# Altium footprint library FootPrintLib_3.PcbLib: 198 footprints (part 1 of 13)
Each footprint in its own frame and in the unit in brackets; x right, y up, seen from the top. Pads: shape width x height; smd on the part's side, far side on the other; paste and mask are expansions set on the pad; w line width, h text height; cw(c..) or ccw(c..) is an arc to the next point about the centre after c.
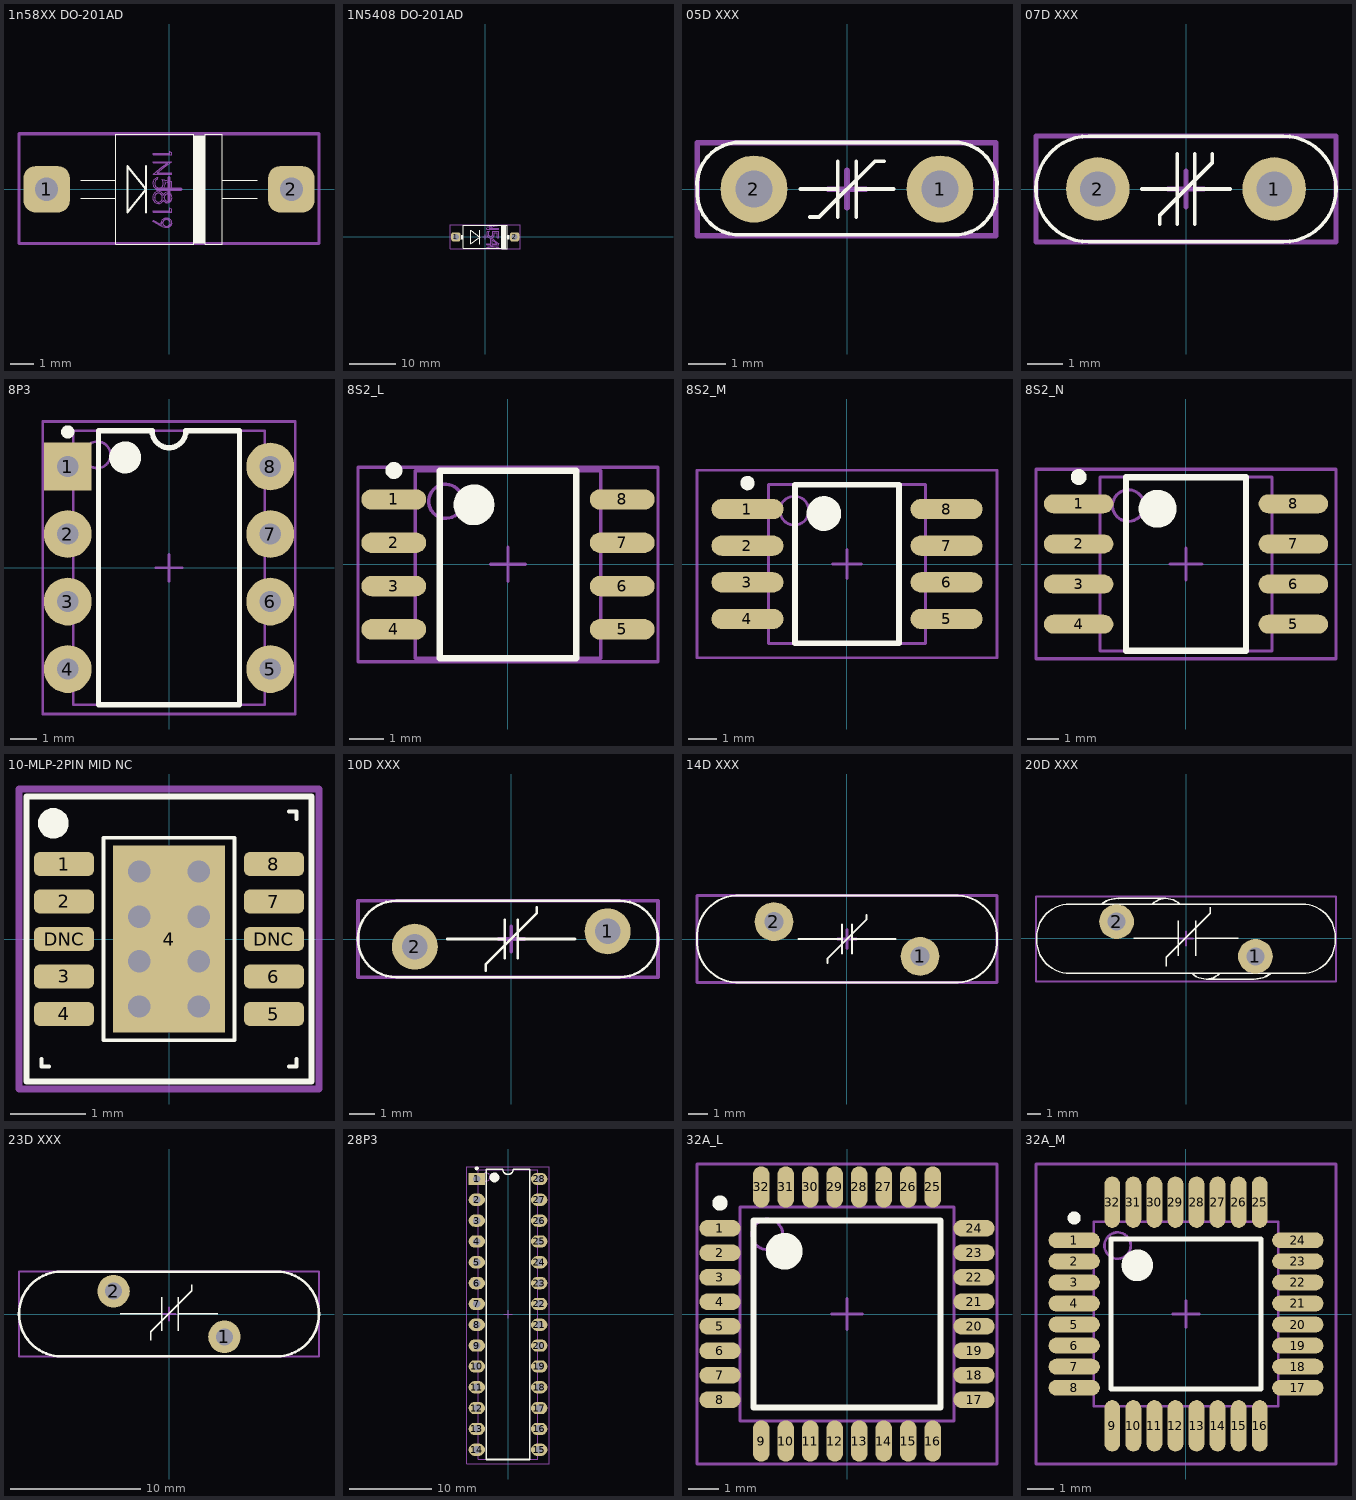
[diagram p0: the footprints below, top view; thin cyan lines are the x and y axes]

## 1n58XX DO-201AD [mm] "Designer Abbas Basereh"
height 5
pads (2):
  rrect50% 2x2 hole 1: 1(-5.3,0) 2(5.3,0)
Top Overlay:
  rectangle: 1.068,-2.31 1.568,2.31
  lines w0.013: -3.818,-0.393 -2.318,-0.393 ; -3.818,0.392 -2.318,0.392 ; 1.068,-2.31 1.568,-2.31 ; 1.068,2.31 1.568,2.31 ; 2.318,-0.393 3.818,-0.393 ; 2.318,0.392 3.818,0.392 ; -2.318,-2.375 1.068,-2.375 1.068,0 1.068,2.375 -2.318,2.375 -2.318,-2.375 ; 1.568,-2.375 2.318,-2.375 2.318,2.375 1.568,2.375 1.568,0 1.568,-2.375
  lines w0.1: -1,-1 -1,1 ; -1.8,-1 -1.8,1 -1,0 -1.8,-1
Mechanical 1:
  lines w0.013: -0.704,-0.352 ccw(c-0.457,-0.365) -0.617,-0.554 ; -0.704,0.26 cw(c-0.467,0.257) -0.48,0.494 ; -0.687,-1.371 -0.347,-1.548 ; -0.684,-0.967 0.11,-0.967 ; -0.684,0.644 -0.372,0.886 -0.061,1.117 -0.061,1.141 ; -0.684,1.177 0.093,1.177 ; -0.684,1.525 0.028,1.525 0.028,1.557 ; -0.511,0.002 -0.481,-0.006 -0.425,-0.011 ; -0.347,-1.442 -0.342,-1.489 -0.342,-1.521 ; -0.337,0.002 -0.371,-0.006 -0.425,-0.011 ; -0.287,0.415 0.11,0.337 ; -0.165,0.233 -0.18,0.324 -0.18,0.331 ; 0.028,1.613 0.11,1.58 ; 0.11,0.696 -0.515,0.696 -0.515,0.711 ; 0.128,-1.442 cw(c-0.081,-1.404) -0.114,-1.614 ; 0.13,-0.357 cw(c-0.081,-0.362) -0.076,-0.573 ; -0.623,-0.36 cw(c-0.449,-0.339) -0.462,-0.163 ; -0.623,-0.36 ccw(c-0.448,-0.379) -0.454,-0.555 ccw(c-0.467,-0.376) -0.287,-0.365 ; -0.623,-0.36 -0.623,-0.353 cw(c-0.451,-0.333) -0.462,-0.16 ; -0.623,0.261 ccw(c-0.425,0.258) -0.422,0.06 ; -0.623,0.261 cw(c-0.453,0.266) -0.48,0.434 -0.48,0.504 ccw(c-0.464,0.265) -0.704,0.265 ccw(c-0.435,0.258) -0.425,-0.011 ; -0.623,0.261 -0.623,0.256 ccw(c-0.427,0.255) -0.422,0.059 ; -0.617,-0.566 cw(c-0.45,-0.374) -0.704,-0.36 cw(c-0.455,-0.343) -0.459,-0.092 cw(c-0.47,-0.336) -0.242,-0.249 cw(c-0.066,-0.325) -0.074,-0.133 cw(c-0.087,-0.351) 0.13,-0.364 cw(c-0.082,-0.373) -0.076,-0.585 ; -0.617,-0.566 -0.541,-0.61 -0.453,-0.624 ; -0.617,-0.566 -0.617,-0.554 ; -0.617,-0.554 -0.54,-0.597 -0.453,-0.611 ; -0.515,0.711 0.11,0.711 0.11,0.642 -0.684,0.642 -0.684,0.658 -0.372,0.905 -0.061,1.141 ; -0.515,0.711 -0.203,0.956 0.11,1.19 0.11,1.203 -0.684,1.203 -0.684,1.141 -0.061,1.141 ; -0.462,-0.163 cw(c-0.472,-0.348) -0.287,-0.365 ; -0.462,-0.163 -0.462,-0.16 ; -0.462,-0.16 cw(c-0.47,-0.343) -0.287,-0.357 -0.287,-0.365 ; -0.453,-0.624 ccw(c-0.462,-0.388) -0.242,-0.475 ; -0.453,-0.624 -0.453,-0.611 ; -0.453,-0.611 ccw(c-0.46,-0.375) -0.242,-0.465 ; -0.425,-0.011 ccw(c-0.411,0.235) -0.165,0.238 -0.18,0.331 ; -0.425,-0.011 -0.425,-0.011 ; -0.422,0.059 ccw(c-0.419,0.232) -0.246,0.246 -0.246,0.251 ; -0.422,0.059 -0.422,0.06 ; -0.422,0.06 ccw(c-0.421,0.235) -0.246,0.251 ; -0.347,-1.582 ccw(c-0.086,-1.111) -0.114,-1.649 ; -0.347,-1.582 -0.704,-1.391 -0.665,-1.345 -0.342,-1.521 ; -0.347,-1.582 -0.347,-1.548 ; -0.347,-1.548 ccw(c-0.092,-1.09) -0.114,-1.614 ; -0.342,-1.521 -0.348,-1.456 cw(c-0.131,-1.474) -0.113,-1.256 cw(c-0.096,-1.483) 0.13,-1.463 cw(c-0.083,-1.437) -0.114,-1.649 ; -0.267,-1.466 cw(c-0.112,-1.471) -0.109,-1.316 ; -0.267,-1.466 ccw(c-0.127,-1.458) -0.109,-1.597 ccw(c-0.099,-1.449) 0.049,-1.46 ; -0.267,-1.466 -0.267,-1.435 cw(c-0.114,-1.442) -0.109,-1.288 ; -0.246,0.251 ccw(c-0.738,0.227) -0.287,0.424 0.11,0.344 0.11,0.02 0.028,0.02 0.028,0.289 -0.18,0.331 ; -0.242,-0.475 ccw(c-0.072,-0.399) -0.076,-0.585 ; -0.242,-0.475 -0.242,-0.465 ; -0.242,-0.465 ccw(c-0.073,-0.386) -0.076,-0.573 ; -0.206,-0.363 ccw(c-0.062,-0.372) -0.073,-0.516 ccw(c-0.086,-0.38) 0.049,-0.36 ; -0.206,-0.363 cw(c-0.055,-0.354) -0.075,-0.204 ; -0.206,-0.363 -0.206,-0.356 cw(c-0.057,-0.348) -0.075,-0.2 ; -0.114,-1.649 -0.114,-1.614 ; -0.109,-1.316 cw(c-0.104,-1.469) 0.049,-1.46 ; -0.109,-1.316 -0.109,-1.288 ; -0.109,-1.288 cw(c-0.103,-1.44) 0.049,-1.43 0.049,-1.46 ; -0.076,-0.585 -0.076,-0.573 ; -0.075,-0.204 cw(c-0.089,-0.343) 0.049,-0.36 ; -0.075,-0.204 -0.075,-0.2 ; -0.075,-0.2 cw(c-0.088,-0.336) 0.049,-0.353 0.049,-0.36 ; 0.028,1.557 0.028,1.648 0.11,1.614 0.11,1.503 -0.684,1.503 -0.684,1.557 0.028,1.557 ; -0.684,-0.988 -0.684,-0.922 0.028,-0.922 0.028,-0.809 0.11,-0.852 0.11,-0.988 -0.684,-0.988
Mechanical 15:
  lines w0.15: -0.5,0 0.5,0 ; 0,-0.5 0,0.5 ; -6.5,-2.35 6.5,-2.35 6.5,2.4 -6.5,2.4 -6.5,-2.35
3D body "User Library-1N5819.STEP": height 5.38, standoff -1.98, extent -5.72,-2.35 5.7,2.4

## 1N5408 DO-201AD [mm] "Designer Abbas Basereh"
height 5
pads (2):
  rrect50% 2x2 hole 1.3: 1(-6.35,0) 2(6.35,0)
Top Overlay:
  rectangle: 3.55,-2.5 4.45,2.5
  rectangle: 4.8,-0.6 5.25,0.4
  rectangle: -5.25,-0.6 -4.7,0.4
  lines w0.013: 3.6,-2.5 0.469,-2.5 -4.7,-2.5 -4.7,2.5 3.6,2.5 ; 3.6,-2.511 3.6,2.511 4.8,2.511 4.8,-2.511 3.6,-2.511
  lines w0.1: -1.15,-1.6 -1.15,1.4 ; -3.15,-1.5 -3.15,1.4 -1.15,-0.1 -3.15,-1.5
Mechanical 1:
  drawing of 280 lines, arcs and shapes, not listed
Mechanical 15:
  lines w0.15: -0.5,0 0.5,0 ; 0,-0.5 0,0.5 ; -7.6,-2.6 -7.6,2.6 7.6,2.6 7.6,-2.6 -7.6,-2.6
3D body "User Library-Diode 1N5408 (pcb).STEP": height 5.51, standoff -2.85, extent -6.95,-2.511 6.95,2.511

## 05D XXX [mm] "MOV-05DxxxK Metal Oxide Varistors (MOVs) are 5 mm-Design:Abbas Basereh"
height 8
pads (2):
  round 1.8 hole 1: 1(2.5,0) 2(-2.5,0)
Top Overlay:
  lines w0.1: -1.25,0 -0.25,0 ; -1,-0.75 -0.75,-0.75 0.75,0.75 1,0.75 ; -0.25,-0.75 -0.25,0.75 ; 0.25,-0.75 0.25,0.75 ; 0.25,0 1.25,0 ; -4.025,0 ccw(c-2.9,-0.1) -3,-1.225 3,-1.225 ccw(c2.9,-0.1) 4.025,0 ccw(c2.887,0.112) 3,1.25 -3,1.25 ccw(c-2.887,0.112) -4.025,0
Mechanical 15:
  lines w0.15: -0.5,0 0.5,0 ; 0,-0.5 0,0.5 ; -4.025,-1.25 4,-1.25 4,1.25 -4.025,1.25 -4.025,-1.25
3D body "User Library-Warystor_5mm.STEP": height 11, standoff -1.57, extent -4.01,-1.26 3.99,1.25

## 07D XXX [mm] "MOV-07DxxxK Metal Oxide Varistors (MOVs) are 7 mm-Design:Abbas Basereh"
height 11
pads (2):
  round 1.8 hole 1: 1(2.5,0) 2(-2.5,0)
Top Overlay:
  lines w0.1: -1.25,0 -0.25,0 ; -0.75,-1 -0.75,-0.75 0.75,0.75 0.75,1 ; -0.25,-1 -0.25,1 ; 0.25,-1 0.25,1 ; 0.25,0 1.25,0 ; -2.75,1.5 ccw(c-2.75,0) -4.25,0 ccw(c-2.75,0) -2.75,-1.5 2.75,-1.5 ; -2.75,1.5 2.75,1.5 cw(c2.75,0) 4.25,0 cw(c2.75,0) 2.75,-1.5 ; -2.75,1.5 -2.75,1.5 ; 2.75,-1.5 2.75,-1.5
Mechanical 15:
  lines w0.15: -0.5,0 0.5,0 ; 0,-0.5 0,0.5 ; -4.25,-1.5 4.25,-1.5 4.25,1.5 -4.25,1.5 -4.25,-1.5
3D body "User Library-Warystor_5mm.STEP": height 11, standoff -1.57, extent -4,-1.26 4,1.25

## 8P3 [mm] "DIP, 8-Leads, Row Spacing 7.62mm, Pitch 2.54mm, Body 9.59x6.61mm"
height 5.34
pads (8):
  rect 1.8x1.8 hole 0.8: 1(-3.81,3.81)
  round 1.8 hole 0.8: 2(-3.81,1.27) 3(-3.81,-1.27) 4(-3.81,-3.81) 5(3.81,-3.81) 6(3.81,-1.27) 7(3.81,1.27) 8(3.81,3.81)
Top Overlay:
  circle w0.6: c-1.65,4.15 r0.3
  circle w0.25: c-3.81,5.11 r0.125
  lines w0.2: -2.65,-5.15 2.65,-5.15 2.65,5.15 0.635,5.15 cw(c0,5.15) -0.635,5.15 -2.65,5.15 -2.65,-5.15
Mechanical 13:
  circle w0.1: c-2.7,4.25 r0.5
  lines w0.1: -3.6,-5.15 3.6,-5.15 3.6,5.15 -3.6,5.15 -3.6,-5.15
Mechanical 15:
  lines w0.1: -0.5,0 0.5,0 ; 0,-0.5 0,0.5 ; -4.75,-5.5 4.75,-5.5 4.75,5.5 -4.75,5.5 -4.75,-5.5
3D body "User Library-DIP8-300-metric.STEP": height 4.5, standoff -3.5, extent -3.88,-5.4 3.88,5.4

## 8S2_L [mm] "SOP, 8-Leads, Body 5.3x5.3mm, Pitch 1.27mm, IPC High Density"
height 2.16
pads (8):
  oval 1.9x0.6 smd: 1(-3.35,1.905) 2(-3.35,0.635) 3(-3.35,-0.635) 4(-3.35,-1.905) 5(3.35,-1.905) 6(3.35,-0.635) 7(3.35,0.635) 8(3.35,1.905)
Top Overlay:
  circle w0.6: c-1,1.75 r0.3
  circle w0.25: c-3.35,2.755 r0.125
  lines w0.2: -2,-2.75 2,-2.75 2,2.75 -2,2.75 -2,-2.75
Mechanical 13:
  circle w0.1: c-1.825,1.85 r0.5
  lines w0.1: -2.725,-2.75 2.725,-2.75 2.725,2.75 -2.725,2.75 -2.725,-2.75
Mechanical 15:
  lines w0.1: -0.5,0 0.5,0 ; 0,-0.5 0,0.5 ; -4.4,-2.85 4.4,-2.85 4.4,2.85 -4.4,2.85 -4.4,-2.85
3D body "User Library-SOP8.STEP": height 1.75, standoff 0, extent -3.1,-2.5 3.1,2.5

## 8S2_M [mm] "SOP, 8-Leads, Body 5.3x5.3mm, Pitch 1.27mm, IPC Low Density"
height 2.16
pads (8):
  oval 2.5x0.7 smd: 1(-3.45,1.905) 2(-3.45,0.635) 3(-3.45,-0.635) 4(-3.45,-1.905) 5(3.45,-1.905) 6(3.45,-0.635) 7(3.45,0.635) 8(3.45,1.905)
Top Overlay:
  circle w0.6: c-0.8,1.75 r0.3
  circle w0.25: c-3.45,2.805 r0.125
  lines w0.2: -1.8,-2.75 1.8,-2.75 1.8,2.75 -1.8,2.75 -1.8,-2.75
Mechanical 13:
  circle w0.1: c-1.825,1.85 r0.5
  lines w0.1: -2.725,-2.75 2.725,-2.75 2.725,2.75 -2.725,2.75 -2.725,-2.75
Mechanical 15:
  lines w0.1: -0.5,0 0.5,0 ; 0,-0.5 0,0.5 ; -5.2,-3.25 5.2,-3.25 5.2,3.25 -5.2,3.25 -5.2,-3.25
3D body "User Library-SOP8.STEP": height 1.75, standoff 0, extent -3.1,-2.5 3.1,2.5

## 8S2_N [mm] "SOP, 8-Leads, Body 5.3x5.3mm, Pitch 1.27mm, IPC Medium Density"
height 2.16
pads (8):
  oval 2.2x0.6 smd: 1(-3.4,1.905) 2(-3.4,0.635) 3(-3.4,-0.635) 4(-3.4,-1.905) 5(3.4,-1.905) 6(3.4,-0.635) 7(3.4,0.635) 8(3.4,1.905)
Top Overlay:
  circle w0.25: c-3.4,2.755 r0.125
  circle w0.6: c-0.9,1.75 r0.3
  lines w0.2: -1.9,-2.75 -1.9,2.75 1.9,2.75 1.9,-2.75 -1.9,-2.75
Mechanical 13:
  circle w0.1: c-1.825,1.85 r0.5
  lines w0.1: -2.725,-2.75 -2.725,2.75 2.725,2.75 2.725,-2.75 -2.725,-2.75
Mechanical 15:
  lines w0.1: -0.5,0 0.5,0 ; 0,-0.5 0,0.5 ; -4.75,-3 -4.75,3 4.75,3 4.75,-3 -4.75,-3
3D body "User Library-SOP8.STEP": height 1.75, standoff 0, extent -3.1,-2.5 3.1,2.5

## 10-MLP-2PIN MID NC [mm] "MO-229, 10-Leads, Body 3x3mm"
height 1
pads (11):
  rrect50% 0.8x0.32 smd mask+0.05: 1(-1.4,1) 2(-1.4,0.5) 3(-1.4,-0.5) 4(-1.4,-1) 5(1.4,-1) 6(1.4,-0.5) 7(1.4,0.5) 8(1.4,1) DNC(-1.4,0) DNC(1.4,0)
  rect 1.5x2.5 smd mask+0.051: 4(0,0)
via -0.4,0.3 diameter 0.5 hole 0.3
via 0.4,-0.9 diameter 0.5 hole 0.3
via -0.4,-0.9 diameter 0.5 hole 0.3
via -0.4,0.9 diameter 0.5 hole 0.3
via 0.4,0.9 diameter 0.5 hole 0.3
via 0.4,-0.3 diameter 0.5 hole 0.3
via -0.4,-0.3 diameter 0.5 hole 0.3
via 0.4,0.3 diameter 0.5 hole 0.3
Top Overlay:
  region: -1.541,1.341 -1.502,1.341 -1.428,1.372 -1.372,1.428 -1.341,1.502 -1.341,1.541 -1.341,1.581 -1.372,1.655 -1.428,1.711 -1.502,1.741 -1.541,1.741 -1.581,1.741 -1.655,1.711 -1.711,1.655 -1.741,1.581 -1.741,1.541 -1.741,1.502 -1.711,1.428 -1.655,1.372 -1.581,1.341
  lines w0.05: -1.7,-1.6 -1.7,-1.7 -1.6,-1.7 ; 1.6,-1.7 1.7,-1.7 1.7,-1.6 ; 1.6,1.7 1.7,1.7 1.7,1.6 ; -0.875,-1.35 -0.875,1.35 0.875,1.35 0.875,-1.35 -0.875,-1.35
  lines w0.075: -1.9,-1.9 1.9,-1.9 1.9,1.9 -1.9,1.9 -1.9,-1.9
Mechanical 15:
  lines w0.1: -0.5,0 0.5,0 ; 0,-0.5 0,0.5 ; -2,-2 -2,2 2,2 2,-2 -2,-2
3D body: height 1, standoff 0, extent -1.7,-1.7 1.7,1.7
3D body: height 1.01, standoff 1, extent -1.3,1 -0.9,1.4

## 10D XXX [mm] "MOV-10DxxxK Metal Oxide Varistors (MOVs) are 10 mm-Design:Abbas Basereh"
height 14.5
pads (2):
  round 1.8 hole 1: 1(3.775,0.3) 2(-3.775,-0.3)
Top Overlay:
  lines w0.1: -2.5,0 -0.25,0 ; -1,-1.25 -1,-1 1,1 1,1.25 ; -0.25,-0.75 -0.25,0.75 ; 0.25,-0.75 0.25,0.75 ; 0.25,0 2.5,0 ; 4.25,-1.5 ccw(c4.25,0) 5.75,0 ccw(c4.25,0) 4.25,1.5 -4.5,1.5 ccw(c-4.5,0) -6,0 ccw(c-4.5,0) -4.5,-1.5 4.25,-1.5 ; 4.25,-1.5 4.25,-1.5
Mechanical 15:
  lines w0.15: -0.5,0 0.5,0 ; 0,-0.5 0,0.5 ; -6,-1.5 5.75,-1.5 5.75,1.5 -6,1.5 -6,-1.5
3D body "User Library-final MOV7,5.STEP": height 16.5, standoff -2, extent -5.776,-0.95 5.525,0.9

## 14D XXX [mm] "MOV-14DxxxK Metal Oxide Varistors (MOVs) are 14 mm-Design:Abbas Basereh"
height 19.5
pads (2):
  round 2 hole 1: 1(3.775,-0.9) 2(-3.775,0.9)
Top Overlay:
  lines w0.1: -2.5,0 -0.25,0 ; -1,-1.25 -1,-1 1,1 1,1.25 ; -0.25,-0.75 -0.25,0.75 ; 0.25,-0.75 0.25,0.75 ; 0.25,0 2.5,0 ; -7.75,0 cw(c-5.625,0.125) -5.75,2.25 5.75,2.25 cw(c5.625,0.125) 7.75,0 cw(c5.625,-0.125) 5.75,-2.25 -5.75,-2.25 cw(c-5.625,-0.125) -7.75,0
Mechanical 15:
  lines w0.15: -0.5,0 0.5,0 ; 0,-0.5 0,0.5 ; -7.75,-2.25 7.75,-2.25 7.75,2.25 -7.75,2.25 -7.75,-2.25
3D body "alsrobot-S14K25 MOV.STEP": height 19.5, standoff -2, extent -7.725,-2.1 7.775,2.1

## 20D XXX [mm] "MOV-20DxxxK Metal Oxide Varistors (MOVs) are 20 mm-Design:Abbas Basereh"
height 23.5
pads (2):
  round 2.5 hole 1.3: 1(5,-1.3) 2(-5,1.2)
Top Overlay:
  drawing of 162 lines, arcs and shapes, not listed
Mechanical 15:
  lines w0.15: -0.5,0 0.5,0 ; 0,-0.5 0,0.5 ; -10.8,-3.1 -10.8,3 10.8,3 10.8,-3.1 -10.8,-3.1
3D body "User Library-Varistor_20mm.STEP": height 25.5, standoff -1.99, extent -10.756,-2.898 10.744,2.9

## 23D XXX [mm] "MOV-23DxxxK Metal Oxide Varistors (MOVs) are 23 mm-Design:Abbas Basereh"
height 29.5
pads (2):
  round 2.5 hole 1.3: 1(4.25,-1.75) 2(-4.25,1.75)
Top Overlay:
  lines w0.1: -3.75,0 -0.57,0 ; -1.415,-2 -1.415,-1.365 1.75,1.8 1.75,2.25 ; -0.57,-1.27 -0.57,1.27 ; 0.7,-1.27 0.7,1.27 ; 0.7,0 3.75,0
  lines w0.2: -11.5,0 ccw(c-8.25,0) -8.25,-3.25 8.25,-3.25 ccw(c8.25,0) 11.5,0 ccw(c8.25,0) 8.25,3.25 -8.25,3.25 ccw(c-8.25,0) -11.5,0
Mechanical 15:
  lines w0.15: -0.5,0 0.5,0 ; 0,-0.5 0,0.5 ; -11.5,-3.25 -11.5,3.25 11.5,3.25 11.5,-3.25 -11.5,-3.25
3D body "User Library-V275LA40AP.STEP": height 28, standoff -2, extent -11.5,-2.8 11.5,2.8

## 28P3 [mm] "DIP, 28-Leads, Row Spacing 7.62mm, Pitch 2.54mm, Body 34.67x7.3mm"
height 4.58
pads (28):
  rect 2x1.5 hole 0.9: 1(-3.81,16.51)
  oval 2x1.5 hole 0.9: 2(-3.81,13.97) 3(-3.81,11.43) 4(-3.81,8.89) 5(-3.81,6.35) 6(-3.81,3.81) 7(-3.81,1.27) 8(-3.81,-1.27) 9(-3.81,-3.81) 10(-3.81,-6.35) 11(-3.81,-8.89) 12(-3.81,-11.43) 13(-3.81,-13.97) 14(-3.81,-16.51) 15(3.81,-16.51) 16(3.81,-13.97) 17(3.81,-11.43) 18(3.81,-8.89) 19(3.81,-6.35) 20(3.81,-3.81) 21(3.81,-1.27) 22(3.81,1.27) 23(3.81,3.81) 24(3.81,6.35) 25(3.81,8.89) 26(3.81,11.43) 27(3.81,13.97) 28(3.81,16.51)
Top Overlay:
  circle w0.6: c-1.65,16.7 r0.3
  circle w0.25: c-3.81,17.81 r0.125
  lines w0.2: -2.65,-17.7 2.65,-17.7 2.65,17.7 0.635,17.7 cw(c0,17.7) -0.635,17.7 -2.65,17.7 -2.65,-17.7
Mechanical 13:
  circle w0.1: c-2.7,16.75 r0.5
  lines w0.1: -3.6,-17.65 3.6,-17.65 3.6,17.65 -3.6,17.65 -3.6,-17.65
Mechanical 15:
  lines w0.1: -0.5,0 0.5,0 ; 0,-0.5 0,0.5 ; -5,-18.25 5,-18.25 5,18 -5,18 -5,-18.25
3D body "User Library-User Library-ATmega 48_88_168_328 28P3_90DEG.STEP": height 5.04, standoff -2.08, extent -3.953,-17.35 3.953,17.3

## 32A_L [mm] "Thin QFP, 32-Leads, Body 7x7mm, Pitch 0.8mm, IPC High Density"
height 1.2
pads (32):
  oval 1.35x0.55 smd mask+0.06: 1(-4.15,2.8) 2(-4.15,2) 3(-4.15,1.2) 4(-4.15,0.4) 5(-4.15,-0.4) 6(-4.15,-1.2) 7(-4.15,-2) 8(-4.15,-2.8) 17(4.15,-2.8) 18(4.15,-2) 19(4.15,-1.2) 20(4.15,-0.4) 21(4.15,0.4) 22(4.15,1.2) 23(4.15,2) 24(4.15,2.8)
  oval 0.55x1.35 smd mask+0.06: 9(-2.8,-4.15) 10(-2,-4.15) 11(-1.2,-4.15) 12(-0.4,-4.15) 13(0.4,-4.15) 14(1.2,-4.15) 15(2,-4.15) 16(2.8,-4.15) 25(2.8,4.15) 26(2,4.15) 27(1.2,4.15) 28(0.4,4.15) 29(-0.4,4.15) 30(-1.2,4.15) 31(-2,4.15) 32(-2.8,4.15)
Top Overlay:
  circle w0.25: c-4.15,3.625 r0.125
  circle w0.6: c-2.05,2.05 r0.3
  lines w0.2: -3.05,-3.05 -3.05,3.05 3.05,3.05 3.05,-3.05 -3.05,-3.05
Mechanical 13:
  circle w0.1: c-2.6,2.6 r0.5
  lines w0.1: -3.5,-3.5 -3.5,3.5 3.5,3.5 3.5,-3.5 -3.5,-3.5
Mechanical 15:
  lines w0.1: -0.5,0 0.5,0 ; 0,-0.5 0,0.5 ; -4.9,-4.9 -4.9,4.9 4.9,4.9 4.9,-4.9 -4.9,-4.9
3D body "User Library-Atmel Atmega 48p Case 32A.STEP": height 1.15, standoff -0.05, extent -4.506,-4.506 4.506,4.506

## 32A_M [mm] "Thin QFP, 32-Leads, Body 7x7mm, Pitch 0.8mm, IPC Low Density"
height 1.2
pads (32):
  oval 1.95x0.6 smd mask+0.06: 1(-4.25,2.8) 2(-4.25,2) 3(-4.25,1.2) 4(-4.25,0.4) 5(-4.25,-0.4) 6(-4.25,-1.2) 7(-4.25,-2) 8(-4.25,-2.8) 17(4.25,-2.8) 18(4.25,-2) 19(4.25,-1.2) 20(4.25,-0.4) 21(4.25,0.4) 22(4.25,1.2) 23(4.25,2) 24(4.25,2.8)
  oval 0.6x1.95 smd mask+0.06: 9(-2.8,-4.25) 10(-2,-4.25) 11(-1.2,-4.25) 12(-0.4,-4.25) 13(0.4,-4.25) 14(1.2,-4.25) 15(2,-4.25) 16(2.8,-4.25) 25(2.8,4.25) 26(2,4.25) 27(1.2,4.25) 28(0.4,4.25) 29(-0.4,4.25) 30(-1.2,4.25) 31(-2,4.25) 32(-2.8,4.25)
Top Overlay:
  circle w0.25: c-4.25,3.65 r0.125
  circle w0.6: c-1.85,1.85 r0.3
  lines w0.2: -2.85,-2.85 -2.85,2.85 2.85,2.85 2.85,-2.85 -2.85,-2.85
Mechanical 13:
  circle w0.1: c-2.6,2.6 r0.5
  lines w0.1: -3.5,-3.5 -3.5,3.5 3.5,3.5 3.5,-3.5 -3.5,-3.5
Mechanical 15:
  lines w0.1: -0.5,0 0.5,0 ; 0,-0.5 0,0.5 ; -5.7,-5.7 -5.7,5.7 5.7,5.7 5.7,-5.7 -5.7,-5.7
3D body "User Library-Atmel Atmega 48p Case 32A.STEP": height 1.15, standoff -0.05, extent -4.506,-4.506 4.506,4.506